# Altium footprint library IC_ESP32-P4NRW32.PcbLib: 1 footprints
Each footprint in its own frame and in the unit in brackets; x right, y up, seen from the top. Pads: shape width x height; smd on the part's side, far side on the other; paste and mask are expansions set on the pad; w line width, h text height; cw(c..) or ccw(c..) is an arc to the next point about the centre after c.
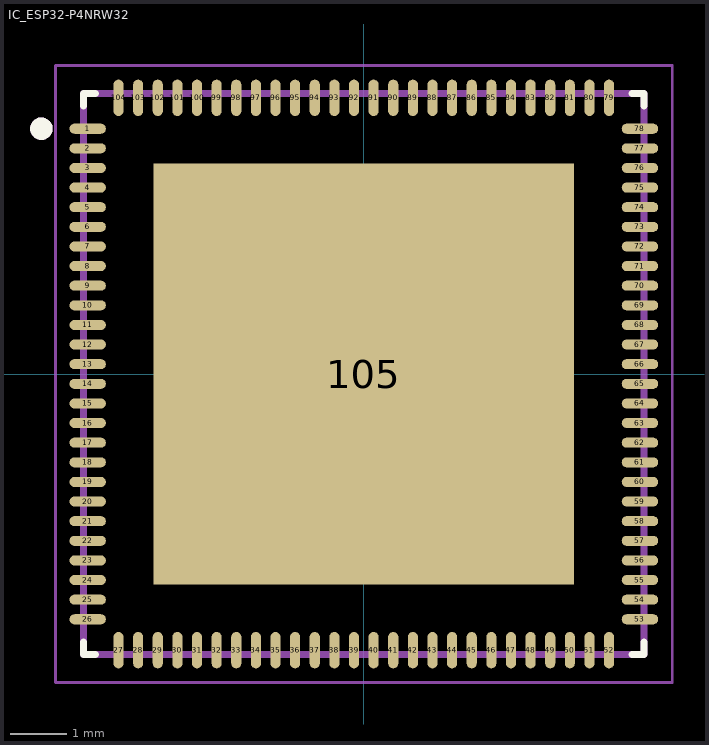
[diagram p0: the footprint, top view; thin cyan lines are the x and y axes]

## IC_ESP32-P4NRW32 [mm]
pads (105):
  oval 0.65x0.18 smd paste+0 mask+0: 1(-4.925,4.375) 2(-4.925,4.025) 3(-4.925,3.675) 4(-4.925,3.325) 5(-4.925,2.975) 6(-4.925,2.625) 7(-4.925,2.275) 8(-4.925,1.925) 9(-4.925,1.575) 10(-4.925,1.225) 11(-4.925,0.875) 12(-4.925,0.525) 13(-4.925,0.175) 14(-4.925,-0.175) 15(-4.925,-0.525) 16(-4.925,-0.875) 17(-4.925,-1.225) 18(-4.925,-1.575) 19(-4.925,-1.925) 20(-4.925,-2.275) 21(-4.925,-2.625) 22(-4.925,-2.975) 23(-4.925,-3.325) 24(-4.925,-3.675) 25(-4.925,-4.025) 26(-4.925,-4.375) 53(4.925,-4.375) 54(4.925,-4.025) 55(4.925,-3.675) 56(4.925,-3.325) 57(4.925,-2.975) 58(4.925,-2.625) 59(4.925,-2.275) 60(4.925,-1.925) 61(4.925,-1.575) 62(4.925,-1.225) 63(4.925,-0.875) 64(4.925,-0.525) 65(4.925,-0.175) 66(4.925,0.175) 67(4.925,0.525) 68(4.925,0.875) 69(4.925,1.225) 70(4.925,1.575) 71(4.925,1.925) 72(4.925,2.275) 73(4.925,2.625) 74(4.925,2.975) 75(4.925,3.325) 76(4.925,3.675) 77(4.925,4.025) 78(4.925,4.375)
  oval 0.18x0.65 smd paste+0 mask+0: 27(-4.375,-4.925) 28(-4.025,-4.925) 29(-3.675,-4.925) 30(-3.325,-4.925) 31(-2.975,-4.925) 32(-2.625,-4.925) 33(-2.275,-4.925) 34(-1.925,-4.925) 35(-1.575,-4.925) 36(-1.225,-4.925) 37(-0.875,-4.925) 38(-0.525,-4.925) 39(-0.175,-4.925) 40(0.175,-4.925) 41(0.525,-4.925) 42(0.875,-4.925) 43(1.225,-4.925) 44(1.575,-4.925) 45(1.925,-4.925) 46(2.275,-4.925) 47(2.625,-4.925) 48(2.975,-4.925) 49(3.325,-4.925) 50(3.675,-4.925) 51(4.025,-4.925) 52(4.375,-4.925) 79(4.375,4.925) 80(4.025,4.925) 81(3.675,4.925) 82(3.325,4.925) 83(2.975,4.925) 84(2.625,4.925) 85(2.275,4.925) 86(1.925,4.925) 87(1.575,4.925) 88(1.225,4.925) 89(0.875,4.925) 90(0.525,4.925) 91(0.175,4.925) 92(-0.175,4.925) 93(-0.525,4.925) 94(-0.875,4.925) 95(-1.225,4.925) 96(-1.575,4.925) 97(-1.925,4.925) 98(-2.275,4.925) 99(-2.625,4.925) 100(-2.975,4.925) 101(-3.325,4.925) 102(-3.675,4.925) 103(-4.025,4.925) 104(-4.375,4.925)
  rect 7.5x7.5 smd paste-2.96 mask+0.102: 105(0,0)
Top Overlay:
  circle w0.2: c-5.75,4.375 r0.1
  lines w0.127: -5,-4.785 -5,-5 -4.785,-5 ; -5,4.785 -5,5 -4.785,5 ; 4.785,-5 5,-5 5,-4.785 ; 4.785,5 5,5 5,4.785
Top Paste:
  region: 3.29,-0.79 1.71,-0.79 1.71,0.79 3.29,0.79
  region: -1.71,-0.79 -3.29,-0.79 -3.29,0.79 -1.71,0.79
  region: 0.79,1.75 -0.79,1.75 -0.79,3.33 0.79,3.33
  region: 3.29,1.71 1.71,1.71 1.71,3.29 3.29,3.29
  region: -1.71,1.71 -3.29,1.71 -3.29,3.29 -1.71,3.29
  region: 0.79,-3.29 -0.79,-3.29 -0.79,-1.71 0.79,-1.71
  region: 3.29,-3.29 1.71,-3.29 1.71,-1.71 3.29,-1.71
  region: -1.71,-3.29 -3.29,-3.29 -3.29,-1.71 -1.71,-1.71
Top Solder:
  drawing of 104 lines, arcs and shapes, not listed
Assembly Top:
  circle w0.2: c-5.75,4.375 r0.1
  lines w0.127: -5,-5 -5,5 5,5 5,-5 -5,-5
Courtyard Top:
  lines w0.05: -5.5,-5.5 -5.5,5.5 5.5,5.5 5.5,-5.5 -5.5,-5.5
3D body "step_temp.STEP": height 0.9, standoff 0, extent -5,-5 5,5